# EAGLE library part UCC21550BDWKR (library UCC21550BDWKR)
4A, 6A Gate Driver Capacitive Coupling 5000Vrms 2 Channel 14-SOIC Source: Datasheet <https://www.ti.com/lit/gpn/UCC21550>
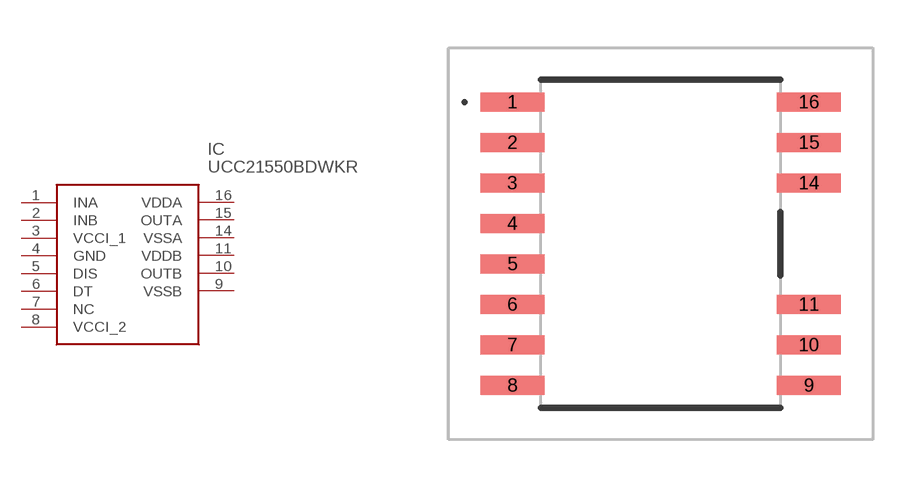
[diagram p0: symbol with the pads of UCC21550BDWKR; footprint UCC21550BDWKR]

Designator prefix IC

## UCC21550BDWKR (Arrow_Part_Number: UCC21550BDWKR; Arrow_Price-Stock: https://www.arrow.com/en/products/ucc21550bdwkr/texas-instruments?utm_currency=USD&region=nac; Description: 4A, 6A Gate Driver Capacitive Coupling 5000Vrms 2 Channel 14-SOIC; Height: 2.65mm; Manufacturer_Name: Texas Instruments; Manufacturer_Part_Number: UCC21550BDWKR; Mouser_Part_Number: 595-UCC21550BDWKR; Mouser_Price-Stock: https://www.mouser.co.uk/ProductDetail/Texas-Instruments/UCC21550BDWKR?qs=IKkN%2F947nfBgJxNddjVcBA%3D%3D)  [UCC21550BDWKR]
1  INA
2  INB
3  VCCI_1
4  GND
5  DIS
6  DT
7  NC  nc
8  VCCI_2
9  VSSB
10  OUTB
11  VDDB
14  VSSA
15  OUTA
16  VDDA

## Footprint UCC21550BDWKR (pad centres in mm)
DWK0014A_2024-6
smd 2 x 0.6: 1 -4.65,4.445; 2 -4.65,3.175; 3 -4.65,1.905; 4 -4.65,0.635; 5 -4.65,-0.635; 6 -4.65,-1.905; 7 -4.65,-3.175; 8 -4.65,-4.445; 9 4.65,-4.445; 10 4.65,-3.175; 11 4.65,-1.905; 14 4.65,1.905; 15 4.65,3.175; 16 4.65,4.445